# Altium schematic symbol library MLG12516.SchLib: 1 symbol
Pins are listed as number, name and electrical type; pins without a type are passive.

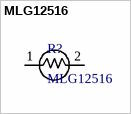
[diagram p0: symbol MLG12516]

## MLG12516
designator R?
CDS PHOTORESISTOR
footprint MLG12516 (CDS PHOTORESISTOR)
pins: 1, 2